# Altium schematic symbol library bms_slave-mc33771c.SCHLIB: 83 symbols (part 2 of 2)
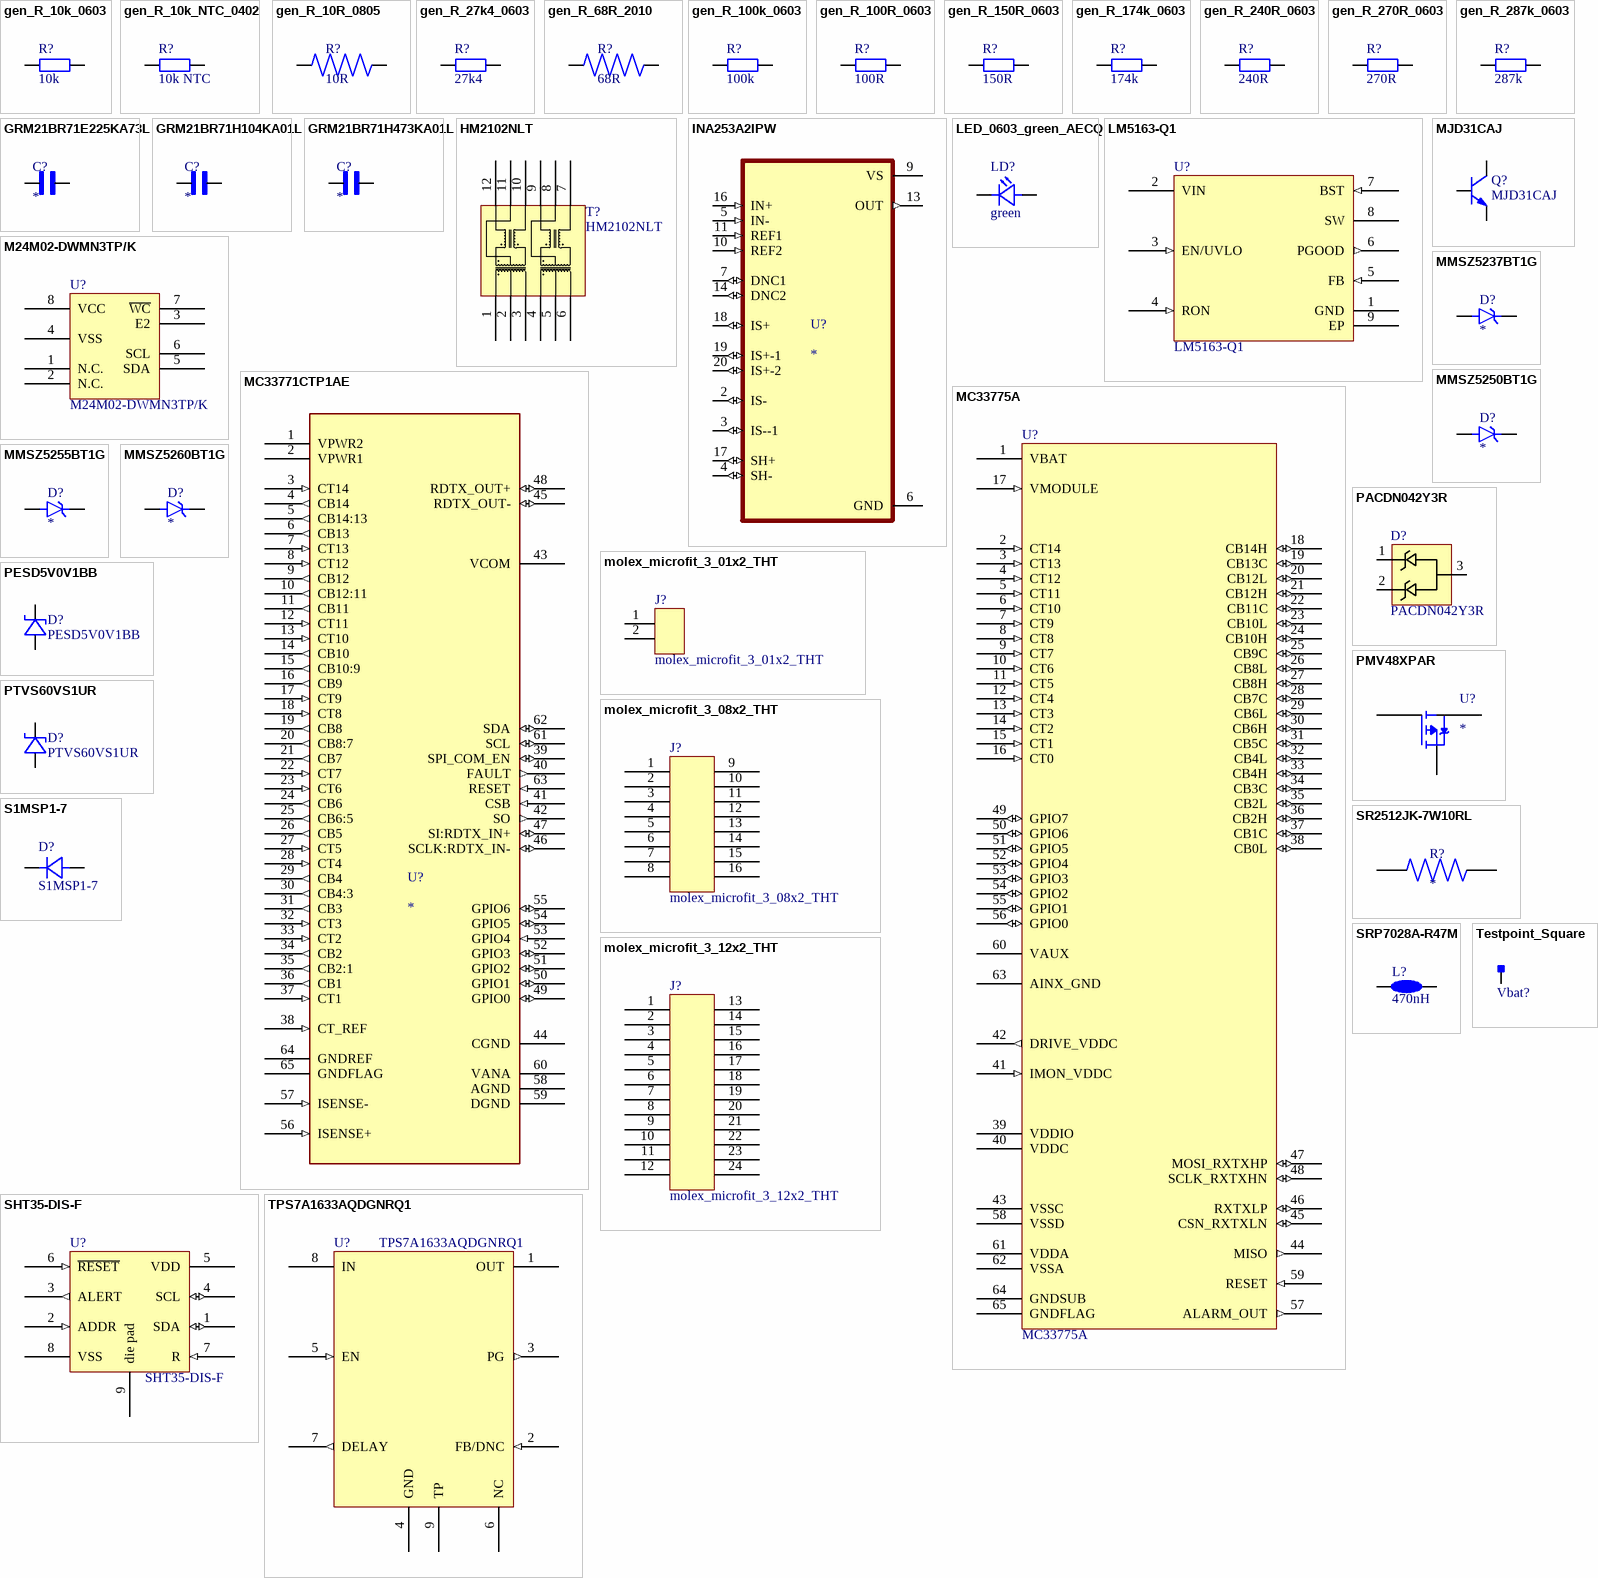
[diagram p3: symbols gen_R_10k_0603 to TPS7A1633AQDGNRQ1]

## SR2512JK-7W10RL
designator R?
MF: {'manufacturer': u'YAGEO'}; MP: SR2512JK-7W10RL; Package: None; Price: None; Value: *; Availability: Unavailable
footprint RESC6331X65N
pins: 1, 2

## SRP7028A-R47M
designator L?, comment 470nH
FIXED IND 470NH 17.5A 4.2 MOHM; Part Number: SRP7028A-R47M; Manufacturer: Bourns Inc; Saturation Current: 26A; Automotive Qualified: True; Operating Temperature: -40°C - +150°C; ComponentLink1Description: Datasheet; ComponentLink1URL: https://www.bourns.com/docs/Product-Datasheets/SRP7028A.pdf; Inductance: 470nH; Rated Current: 17.5A; Supplier 1: Digikey; Supplier Part Number 1: SRP7028A-R47MCT-ND; Supplier 2: Farnell; Supplier Part Number 2: 2434106
footprint SRP7028A
pins: 1, 2

## Testpoint_Square
designator Vbat?  (value not drawn)  (no BOM)
Testpoint, square; Automotive Qualified: False; Part Number: Testpoint_Square
footprint Testpoint_S1
footprint Testpoint_S2
pins: 1

## TPS7A1633AQDGNRQ1
designator U?
Automotive 60-V, 5-µA IQ, 100-mA low-dropout (LDO) voltage regulator with enable and power good; Part Name: TPS7A16A-Q1; Manufacturer: Texas Instruments; PnP Package: HVSSOP-8; Automotive Qualified: True; AEC-Q Norm: AEC-Q100; AEC-Q Grade: Grade 1; Part Number: TPS7A1633AQDGNRQ1; Operating Temperature: -40°C - +125°C; ComponentLink1Description: Datasheet; ComponentLink1URL: http://www.ti.com/lit/ds/symlink/tps7a16a-q1.pdf; Supplier 1: Digikey; Supplier Part Number 1: 296-TPS7A1633AQDGNRQ1TR-ND; Supplier 2: Mouser; Supplier Part Number 2: 595-PS7A1633AQDGNRQ1; ECCN: EAR99
footprint TPS7A16A-Q1
pins: 1 OUT (power) "Regulator output pin.", 2 FB/DNC (in) "For the adjustable version,the feedback pin is the input to the control-loop error amplifier. This pin is used to set the output voltage of the device when the regulator output voltage is set by external resistors. For the fixed-voltage versions, do not connect to this pin. Do not route this pin to any electrical net, not evento GND or IN.", 3 PG (out) "Power-good pin.", 4 GND (power) "Ground pin", 5 EN (in) "Enable pin. This pin turns the regulator on or off. If Ven >= Ven,hi the regulator is enabled. If Ven <= Ven,lo the regulator is disabled. If not used, the EN pin can be connected to IN. Make sure that Ven <= Vin at all times.", 6 NC "This pin can be left open or tied to any voltage between GND and IN.", 7 DELAY (out) "Delay pin. Connect a capacitor to GND to adjust the PG delay time; leave open if the reset function is not needed.", 8 IN (power) "Regulator Input supply pin.", 9 TP (power) "Thermal pad. Connect to GND."

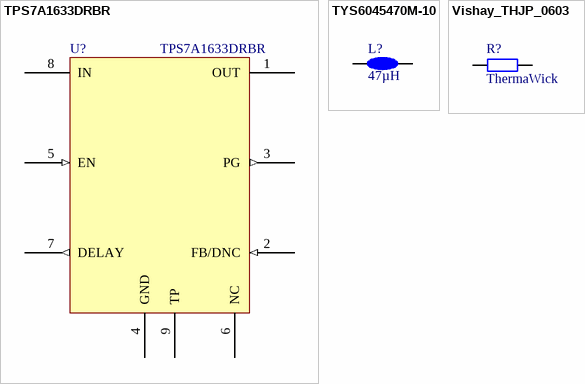
[diagram p2: symbols TPS7A1633DRBR to Vishay_THJP_0603]

## TPS7A1633DRBR
designator U?
Automotive 60-V, 5-µA IQ, 100-mA low-dropout (LDO) voltage regulator with enable and power good; Part Name: TPS7A16A-Q1; Manufacturer: Texas Instruments; PnP Package: VSON-8; Automotive Qualified: False; Part Number: TPS7A1633DRBR; Operating Temperature: -40°C - +125°C; ComponentLink1Description: Datasheet; ComponentLink1URL: https://www.ti.com/lit/ds/symlink/tps7a16.pdf; Supplier 1: Mouser; Supplier Part Number 1: 595-TPS7A1633DRBR / 595-TPS7A1633DRBR / 595-TPS7A1633DRBR; ECCN: EAR99
footprint TPS7A16_VSON
pins: 1 OUT (power) "Regulator output pin.", 2 FB/DNC (in) "For the adjustable version,the feedback pin is the input to the control-loop error amplifier. This pin is used to set the output voltage of the device when the regulator output voltage is set by external resistors. For the fixed-voltage versions, do not connect to this pin. Do not route this pin to any electrical net, not evento GND or IN.", 3 PG (out) "Power-good pin.", 4 GND (power) "Ground pin", 5 EN (in) "Enable pin. This pin turns the regulator on or off. If Ven >= Ven,hi the regulator is enabled. If Ven <= Ven,lo the regulator is disabled. If not used, the EN pin can be connected to IN. Make sure that Ven <= Vin at all times.", 6 NC "This pin can be left open or tied to any voltage between GND and IN.", 7 DELAY (out) "Delay pin. Connect a capacitor to GND to adjust the PG delay time; leave open if the reset function is not needed.", 8 IN (power) "Regulator Input supply pin.", 9 TP (power) "Thermal pad. Connect to GND."

## TYS6045470M-10
designator L?, comment 47µH
Power Inductor; Part Number: TYS6045470M-10; Manufacturer: Laird-Signal Integrity Products; Rated Current: 1.2A; Saturation Current: 1.4A; Automotive Qualified: True; Operating Temperature: -55°C - +150°C; ComponentLink1Description: Datasheet; ComponentLink1URL: http://assets.lairdtech.com/home/brandworld/files/TYS6045470M-10.pdf; Inductance: 47µH; Supplier 1: Digikey; Supplier Part Number 1: 240-2745-1-ND
footprint TYS6045470M-10
pins: 1, 2

## Vishay_THJP_0603
designator R?, comment ThermaWick
ThermaWick thermal coupling 0603; Part Number: Vishay_THJP_0603; Case EIA: 0603; Maximum Working Voltage: 1.5kV; Automotive Qualified: False; Resistance: ThermaWick; Series: Thermal Jumper; Supplier 1: Mouser; Supplier Part Number 1: 71-THJP0603AST1; ECCN: EAR99
footprint Vishay_THJP_0603
pins: 1, 2
1 alternate drawing of the same symbol